# Altium integrated library Ceramic Capacitor 100nF 1206.IntLib: 1 symbol
Pins are listed as number, name and electrical type; pins without a type are passive.

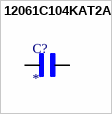
[diagram p0: symbol 12061C104KAT2A]

## 12061C104KAT2A
designator C?
0.1 ÂµF Â±10% 100V Ceramic Capacitor X7R 1206 (3216 Metric); MF: KYOCERA AVX; MP: 12061C104KAT2A; SnapEDA_Link: https://www.snapeda.com/parts/12061C104KAT2A/Kyocera/view-part/?ref=snap; Package: 3216 AVX; Value: *; Check_prices: https://www.snapeda.com/parts/12061C104KAT2A/Kyocera/view-part/?ref=eda
footprint CAPC3216X127N
pins: 1, 2